# Altium footprint library SamacSys.PcbLib: 88 footprints (part 1 of 6)
Each footprint in its own frame and in the unit in brackets; x right, y up, seen from the top. Pads: shape width x height; smd on the part's side, far side on the other; paste and mask are expansions set on the pad; w line width, h text height; cw(c..) or ccw(c..) is an arc to the next point about the centre after c.
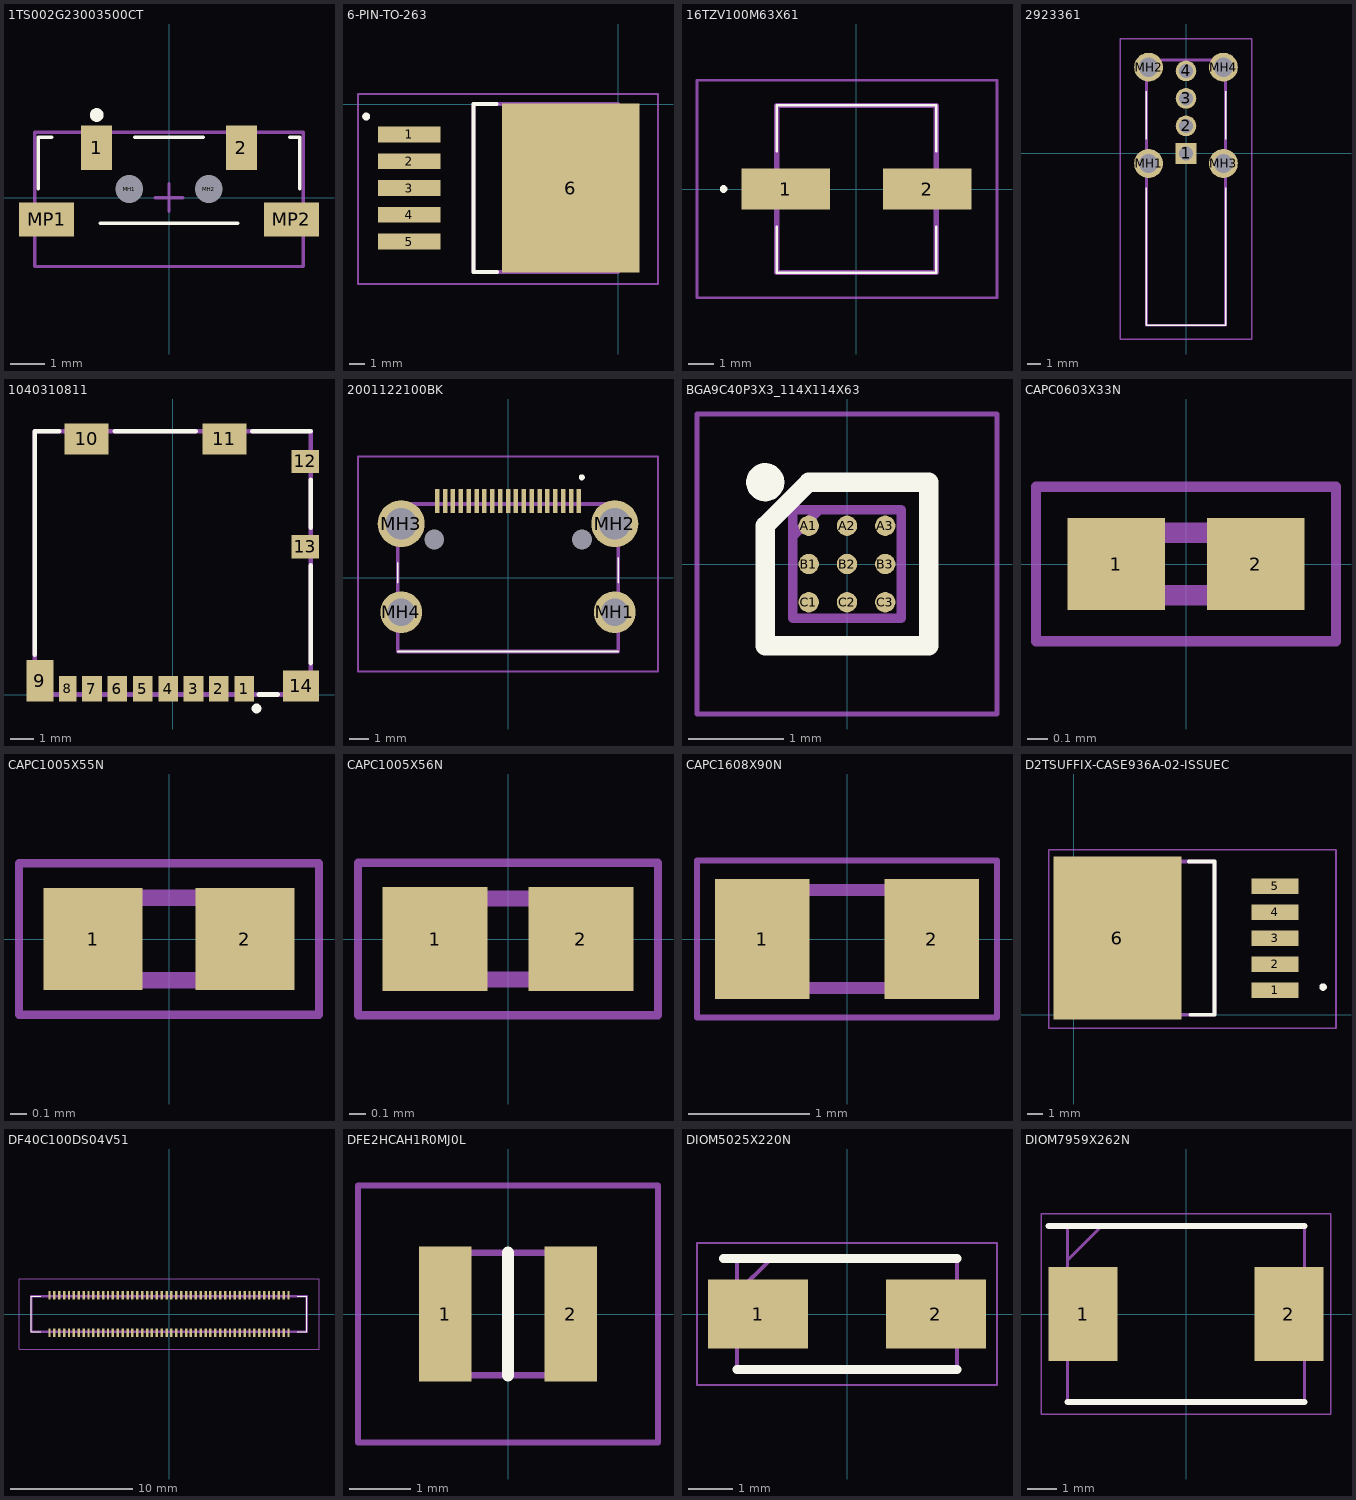
[diagram p0: the footprints below, top view; thin cyan lines are the x and y axes]

## 1TS002G23003500CT [mm]
pads (6):
  rect 0.9x1.3 smd: 1(-2.1,1.45) 2(2.1,1.45)
  round 0.4 hole 0.8 unplated: MH1(-1.15,0.25) MH2(1.15,0.25)
  rect 1.6x1 smd: MP1(-3.556,-0.635) MP2(3.556,-0.635)
Top Overlay:
  lines w0.1: -3.8,0.25 -3.8,1.75 -3.4,1.75 ; -2,-0.75 2,-0.75 ; -1,1.75 1,1.75 ; 3.5,1.75 3.8,1.75 3.8,0.25
  lines w0.2: -2.1,2.3 ccw(c-2.1,2.4) -2.1,2.5 ccw(c-2.1,2.4) -2.1,2.3
Top Component Outline:
  lines w0.1: -3.9,-2 3.9,-2 3.9,1.9 -3.9,1.9 -3.9,-2
Top Component Center:
  lines w0.1: -0.4,0 0.4,0 ; 0,-0.4 0,0.4
Top Value:
  text "'.Comment'" at -2.202,-0.304 h1.02
Top Designator:
  text "'.Designator'" at -3.28,-0.446 h1.14
3D body "Tact_switchSide_sticker3x6x3_5_-.STEP": height 3.5, standoff -0.8, extent -3.9,-2.032 3.9,1.848

## 6-PIN-TO-263 [mm]
pads (6):
  rect 3.95x1 smd: 1(-13.25,-1.93) 2(-13.25,-3.632) 3(-13.25,-5.334) 4(-13.25,-7.036) 5(-13.25,-8.738)
  rect 8.75x10.75 smd: 6(-3,-5.334)
Top Overlay:
  circle w0.254: c-15.993,-0.796 r0.121
  lines w0.254: -7.713,0 -9.169,0 -9.169,-10.668 -7.691,-10.668
Body Extra:
  lines w0.254: -9.169,-10.668 -9.169,0 0,0 0,-10.668 -9.169,-10.668
Bottom Courtyard:
  lines w0.1: -16.51,-11.43 -16.51,0.635 2.54,0.635 2.54,-11.43 -16.51,-11.43
  text ".Designator" at -9.144,-5.461 h1.52

## 16TZV100M63X61 [mm]
pads (2):
  rect 3.5x1.6 smd: 1(-2.8,0) 2(2.8,0)
Top Overlay:
  lines w0.1: -3.15,-1.5 -3.15,-3.3 3.15,-3.3 3.15,-1.5 ; -3.15,1.5 -3.15,3.3 3.15,3.3 3.15,1.5
  lines w0.2: -5.3,0 ccw(c-5.25,0) -5.2,0 ; -5.3,0 cw(c-5.25,0) -5.2,0 ; -5.3,0 ccw(c-5.25,0) -5.2,0
Body Extra:
  lines w0.2: -3.15,-3.3 3.15,-3.3 3.15,3.3 -3.15,3.3 -3.15,-3.3
Bottom Courtyard:
  lines w0.1: -6.3,-4.3 5.55,-4.3 5.55,4.3 -6.3,4.3 -6.3,-4.3
  text ".Designator" at -1.016,-0.254 h1.52
3D body "16TZV100M6.3X6.1.stp": height 6.2, standoff 0, extent -4.39,-3.3 4.39,3.3

## 2923361 [mm]
pads (8):
  rect 1.5x1.5 hole 1: 1(0,0)
  round 1.5 hole 1: 2(0,2) 3(0,4) 4(0,6)
  round 2.1 hole 1.4: MH1(-2.72,-0.73) MH2(-2.72,6.27) MH3(2.72,-0.73) MH4(2.72,6.27)
Top Overlay:
  lines w0.1: 2.88,-12.48 2.88,-2.48 2.88,-12.48 ; 2.88,-12.48 -2.88,-12.48 2.88,-12.48 ; -2.88,-12.49 -2.88,-2.48 -2.88,-12.49 ; -2.88,1.02 -2.88,4.52 -2.88,1.02 ; 2.88,1.02 2.88,4.52 2.88,1.02
Body Extra:
  lines w0.2: -2.88,-12.49 -2.88,6.8 2.88,6.8 2.88,-12.49 -2.88,-12.49
Bottom Courtyard:
  lines w0.1: -4.77,-13.49 -4.77,8.32 4.77,8.32 4.77,-13.49 -4.77,-13.49
  text ".Designator" at -1.778,0.635 h1.52
3D body "292336-1.stp": height 12.7, standoff -5, extent -3.315,-12.49 3.32,6.869

## 1040310811 [mm]
pads (14):
  rect 0.85x1.1 smd: 1(3.105,0.25) 2(2.005,0.25) 3(0.905,0.25) 4(-0.195,0.25) 5(-1.295,0.25) 6(-2.395,0.25) 7(-3.495,0.25)
  rect 0.75x1.1 smd: 8(-4.545,0.25)
  rect 1.17x1.8 smd: 9(-5.755,0.6)
  rect 1.9x1.35 smd: 10(-3.73,11.075) 11(2.24,11.075)
  rect 1.2x1 smd: 12(5.74,10.1) 13(5.74,6.4)
  rect 1.55x1.35 smd: 14(5.565,0.375)
Top Overlay:
  circle w0.2: c3.634,-0.605 r0.113
  lines w0.2: -5.975,1.721 -5.975,11.4 -4.914,11.4 ; -2.5,11.4 1,11.4 ; 3.455,11.4 5.975,11.4 ; 3.739,0 4.56,0 ; 5.975,1.367 5.975,5.601 ; 5.975,7.216 5.975,9.297
Top Component Outline:
  lines w0.2: -5.975,0 5.975,0 5.975,11.4 -5.975,11.4 -5.975,0
3D body "104031-0811.stp": height 1.44, standoff -0.01, extent -5.875,0.117 6.075,11.517
3D body "Micro SD card.SLDPRT": height 1.51, standoff 0.49, extent -5.2,-4 5.8,11

## 2001122100BK [mm]
pads (25):
  rect 0.23x1.2 smd: 1(3.605,3.9) 2(3.205,3.9) 3(2.805,3.9) 4(2.405,3.9) 5(2.005,3.9) 6(1.605,3.9) 7(1.205,3.9) 8(0.805,3.9) 9(0.405,3.9) 10(0.005,3.9) 11(-0.395,3.9) 12(-0.795,3.9) 13(-1.195,3.9) 14(-1.595,3.9) 15(-1.995,3.9) 16(-2.395,3.9) 17(-2.795,3.9) 18(-3.195,3.9) 19(-3.595,3.9)
  round 2.122 hole 1.415: MH1(5.425,-1.75) MH4(-5.425,-1.75)
  round 2.39 hole 1.594: MH2(5.425,2.75) MH3(-5.425,2.75)
  round 0.5 hole 1 unplated: MH5(3.755,1.95) MH6(-3.745,1.95)
Top Overlay:
  lines w0.1: -5.6,-3.75 5.6,-3.75 -5.6,-3.75 ; -5.6,-0.25 -5.6,0.75 -5.6,-0.25 ; 5.6,-0.25 5.6,1 5.6,-0.25
  lines w0.2: 3.7,5.1 ccw(c3.75,5.1) 3.8,5.1 ; 3.7,5.1 cw(c3.75,5.1) 3.8,5.1 ; 3.7,5.1 3.8,5.1
Body Extra:
  lines w0.2: -5.6,-3.75 5.6,-3.75 5.6,3.75 -5.6,3.75 -5.6,-3.75
Bottom Courtyard:
  lines w0.1: -7.62,-4.75 7.62,-4.75 7.62,6.152 -7.62,6.152 -7.62,-4.75
  text ".Designator" at -1.016,-0.254 h1.52
3D body "2001-1-2-21-00-BK.stp": height 3.4, standoff -5, extent -6.116,-3.75 6.122,4.477

## BGA9C40P3X3_114X114X63 [mm]
pads (9):
  round 0.212 smd: A1(-0.4,0.4) A2(0,0.4) A3(0.4,0.4) B1(-0.4,0) B2(0,0) B3(0.4,0) C1(-0.4,-0.4) C2(0,-0.4) C3(0.4,-0.4)
Top Overlay:
  circle w0.2: c-0.856,0.856 r0.1
  lines w0.2: -0.856,-0.856 -0.856,0.4 -0.4,0.856 0.856,0.856 0.856,-0.856 -0.856,-0.856
Body Extra:
  lines w0.1: -0.57,0.285 -0.285,0.57 ; -0.57,-0.57 -0.57,0.57 0.57,0.57 0.57,-0.57 -0.57,-0.57
Bottom Courtyard:
  lines w0.05: -1.57,-1.57 -1.57,1.57 1.57,1.57 1.57,-1.57 -1.57,-1.57
  text ".Designator" at -1.016,-0.254 h1.52
3D body "ESD5384NCTBG.stp": height 0.63, standoff 0, extent -0.57,-0.57 0.57,0.57

## CAPC0603X33N [mm]
pads (2):
  rect 0.47x0.44 smd: 1(-0.335,0) 2(0.335,0)
Top Component Outline:
  lines w0.1: -0.3,-0.15 0.3,-0.15 0.3,0.15 -0.3,0.15 -0.3,-0.15
Top Courtyard:
  lines w0.05: -0.72,-0.37 0.72,-0.37 0.72,0.37 -0.72,0.37 -0.72,-0.37
3D body "02016D105MAT2A.stp": height 0.33, standoff 0, extent -0.3,-0.15 0.3,0.15

## CAPC1005X55N [mm]
pads (2):
  rect 0.6x0.62 smd: 1(-0.46,0) 2(0.46,0)
Body Extra:
  lines w0.1: -0.5,-0.25 0.5,-0.25 0.5,0.25 -0.5,0.25 -0.5,-0.25
Bottom Courtyard:
  lines w0.05: -0.91,-0.46 0.91,-0.46 0.91,0.46 -0.91,0.46 -0.91,-0.46
  text ".Designator" at -0.508,-0.127 h0.76
3D body "CL05B104KO5NNNC.stp": height 0.55, standoff 0, extent -0.5,-0.25 0.5,0.25

## CAPC1005X56N [mm]
pads (2):
  rect 0.65x0.64 smd: 1(-0.45,0) 2(0.45,0)
Top Component Outline:
  lines w0.1: -0.5,-0.25 -0.5,0.25 0.5,0.25 0.5,-0.25 -0.5,-0.25
Top Courtyard:
  lines w0.05: -0.925,-0.47 -0.925,0.47 0.925,0.47 0.925,-0.47 -0.925,-0.47
3D body "04025C104KAT2A.stp": height 0.56, standoff 0, extent -0.5,-0.25 0.5,0.25

## CAPC1608X90N [mm]
pads (2):
  rect 0.78x0.99 smd: 1(-0.7,0) 2(0.7,0)
Top Component Outline:
  lines w0.1: -0.8,-0.405 -0.8,0.405 0.8,0.405 0.8,-0.405 -0.8,-0.405
Top Courtyard:
  lines w0.05: -1.24,-0.65 -1.24,0.65 1.24,0.65 1.24,-0.65 -1.24,-0.65
3D body "06031C104JAT2A.stp": height 0.9, standoff 0, extent -0.8,-0.405 0.8,0.405

## D2TSUFFIX-CASE936A-02-ISSUEC [mm]
pads (6):
  rect 3.05x1.016 smd: 1(13.155,1.606) 2(13.155,3.308) 3(13.155,5.01) 4(13.155,6.712) 5(13.155,8.414)
  rect 8.38x10.66 smd: 6(2.85,5.01)
Top Overlay:
  circle w0.254: c16.3,1.81 r0.116
  lines w0.254: 7.52,10.02 9.2,10.02 9.2,0 7.612,0
Body Extra:
  lines w0.254: 0,0 9.2,0 9.2,10.02 0,10.02 0,0
Bottom Courtyard:
  lines w0.1: -1.651,-0.889 17.145,-0.889 17.145,10.795 -1.651,10.795 -1.651,-0.889
  text ".Designator" at 4.953,4.826 h1.52

## DF40C100DS04V51 [mm]
pads (100):
  rect 0.2x0.7 smd: 1(-9.8,-1.54) 2(-9.8,1.54) 3(-9.4,-1.54) 4(-9.4,1.54) 5(-9,-1.54) 6(-9,1.54) 7(-8.6,-1.54) 8(-8.6,1.54) 9(-8.2,-1.54) 10(-8.2,1.54) 11(-7.8,-1.54) 12(-7.8,1.54) 13(-7.4,-1.54) 14(-7.4,1.54) 15(-7,-1.54) 16(-7,1.54) 17(-6.6,-1.54) 18(-6.6,1.54) 19(-6.2,-1.54) 20(-6.2,1.54) 21(-5.8,-1.54) 22(-5.8,1.54) 23(-5.4,-1.54) 24(-5.4,1.54) 25(-5,-1.54) 26(-5,1.54) 27(-4.6,-1.54) 28(-4.6,1.54) 29(-4.2,-1.54) 30(-4.2,1.54) 31(-3.8,-1.54) 32(-3.8,1.54) 33(-3.4,-1.54) 34(-3.4,1.54) 35(-3,-1.54) 36(-3,1.54) 37(-2.6,-1.54) 38(-2.6,1.54) 39(-2.2,-1.54) 40(-2.2,1.54) 41(-1.8,-1.54) 42(-1.8,1.54) 43(-1.4,-1.54) 44(-1.4,1.54) 45(-1,-1.54) 46(-1,1.54) 47(-0.6,-1.54) 48(-0.6,1.54) 49(-0.2,-1.54) 50(-0.2,1.54) 51(0.2,-1.54) 52(0.2,1.54) 53(0.6,-1.54) 54(0.6,1.54) 55(1,-1.54) 56(1,1.54) 57(1.4,-1.54) 58(1.4,1.54) 59(1.8,-1.54) 60(1.8,1.54) 61(2.2,-1.54) 62(2.2,1.54) 63(2.6,-1.54) 64(2.6,1.54) 65(3,-1.54) 66(3,1.54) 67(3.4,-1.54) 68(3.4,1.54) 69(3.8,-1.54) 70(3.8,1.54) 71(4.2,-1.54) 72(4.2,1.54) 73(4.6,-1.54) 74(4.6,1.54) 75(5,-1.54) 76(5,1.54) 77(5.4,-1.54) 78(5.4,1.54) 79(5.8,-1.54) 80(5.8,1.54) 81(6.2,-1.54) 82(6.2,1.54) 83(6.6,-1.54) 84(6.6,1.54) 85(7,-1.54) 86(7,1.54) 87(7.4,-1.54) 88(7.4,1.54) 89(7.8,-1.54) 90(7.8,1.54) 91(8.2,-1.54) 92(8.2,1.54) 93(8.6,-1.54) 94(8.6,1.54) 95(9,-1.54) 96(9,1.54) 97(9.4,-1.54) 98(9.4,1.54) 99(9.8,-1.54) 100(9.8,1.54)
Top Overlay:
  lines w0.1: -10.5,-1.44 -11.3,-1.44 -11.3,1.44 -10.5,1.44 ; 10.5,-1.44 11.3,-1.44 11.3,1.44 10.5,1.44
Body Extra:
  lines w0.2: -11.3,-1.44 11.3,-1.44 11.3,1.44 -11.3,1.44 -11.3,-1.44
Bottom Courtyard:
  lines w0.1: -12.3,-2.89 12.3,-2.89 12.3,2.89 -12.3,2.89 -12.3,-2.89
3D body "DF40C-100DS-0.4V_51_.stp": height 1.75, standoff 0, extent -11.3,-1.87 11.3,1.87

## DFE2HCAH1R0MJ0L [mm]
pads (2):
  rect 0.85x2.2 smd: 1(-1.025,0) 2(1.025,0)
Top Overlay:
  lines w0.2: 0,-1 0,1
Body Extra:
  lines w0.1: -1.25,-1 -1.25,1 1.25,1 1.25,-1 -1.25,-1
Bottom Courtyard:
  lines w0.1: -2.45,-2.1 -2.45,2.1 2.45,2.1 2.45,-2.1 -2.45,-2.1
3D body "1239AS-H-4R7M=P2.stp": height 1.2, standoff 0, extent -1.25,-1 1.25,1

## DIOM5025X220N [mm]
pads (2):
  rect 2.25x1.55 smd: 1(-2,0) 2(2,0)
Top Overlay:
  lines w0.2: -2.775,1.25 2.475,1.25 ; -2.475,-1.25 2.475,-1.25
Top Component Outline:
  lines w0.1: -2.475,0.475 -1.7,1.25 ; -2.475,-1.25 -2.475,1.25 2.475,1.25 2.475,-1.25 -2.475,-1.25
Top Courtyard:
  lines w0.05: -3.375,-1.6 -3.375,1.6 3.375,1.6 3.375,-1.6 -3.375,-1.6
3D body "1N4007G.stp": height 2.2, standoff 0, extent -2.475,-1.25 2.475,1.25

## DIOM7959X262N [mm]
pads (2):
  rect 2.3x3.15 smd: 1(-3.45,0) 2(3.45,0)
Top Overlay:
  lines w0.2: -4.6,2.952 3.97,2.952 ; -3.97,-2.952 3.97,-2.952
Body Extra:
  lines w0.1: -3.97,1.802 -2.82,2.952 ; -3.97,-2.952 -3.97,2.952 3.97,2.952 3.97,-2.952 -3.97,-2.952
Bottom Courtyard:
  lines w0.05: -4.85,-3.36 -4.85,3.36 4.85,3.36 4.85,-3.36 -4.85,-3.36
  text ".Designator" at -1.524,-0.254 h1.52
3D body "SS34.stp": height 2.62, standoff 0, extent -3.97,-2.953 3.97,2.953